# Altium footprint library TAJC.PcbLib: 1 footprints
Each footprint in its own frame and in the unit in brackets; x right, y up, seen from the top. Pads: shape width x height; smd on the part's side, far side on the other; paste and mask are expansions set on the pad; w line width, h text height; cw(c..) or ccw(c..) is an arc to the next point about the centre after c.
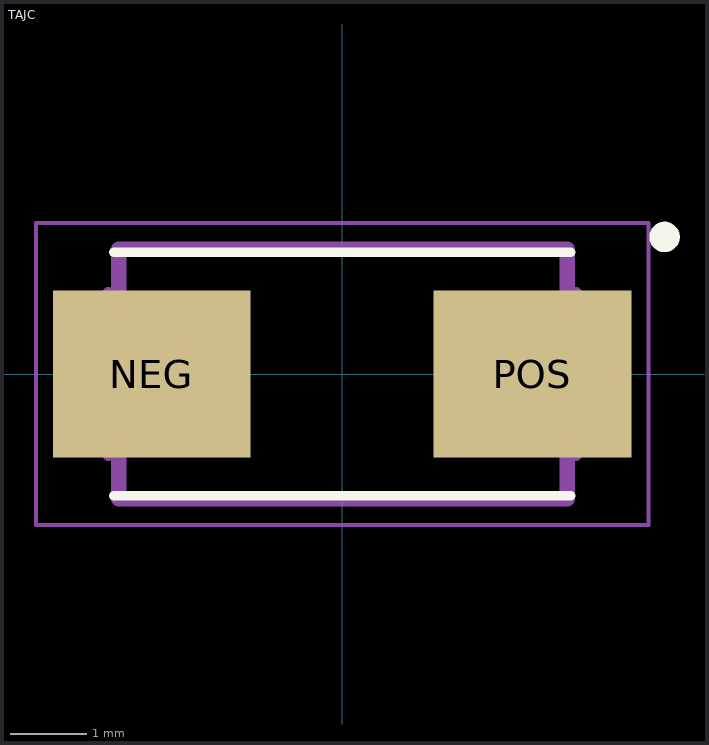
[diagram p0: the footprint, top view; thin cyan lines are the x and y axes]

## TAJC [mm]
pads (2):
  rect 2.6x2.2 smd: NEG(-2.5,0) POS(2.5,0)
Top Overlay:
  circle w0.2: c4.236,1.8 r0.1
  lines w0.127: -3,-1.6 3,-1.6 ; -3,1.6 3,1.6
Mechanical 13:
  lines w0.152: -3.073,-1.067 -3.073,1.067 -3.073,-1.067 ; 3.073,-1.067 3.073,1.067 3.073,-1.067
  lines w0.203: -2.932,-1.637 2.957,-1.637 ; -2.932,-1.637 -2.932,1.637 ; -2.932,-1.637 2.957,-1.637 ; -2.932,-1.637 -2.932,1.637 ; -2.932,1.637 2.957,1.637 ; -2.932,1.637 2.957,1.637 ; 2.957,-1.637 2.957,1.637 ; 2.957,-1.637 2.957,1.637
Mechanical 15:
  lines w0.051: -4.023,-1.983 -4.023,1.983 4.023,1.983 4.023,-1.983 -4.023,-1.983
3D body "TAJC.step": height 2.79, standoff -0.04, extent -3.83,-1.756 3.767,1.756